# Altium footprint library PCB1.PcbLib: 25 footprints (part 1 of 2)
Each footprint in its own frame and in the unit in brackets; x right, y up, seen from the top. Pads: shape width x height; smd on the part's side, far side on the other; paste and mask are expansions set on the pad; w line width, h text height; cw(c..) or ccw(c..) is an arc to the next point about the centre after c.
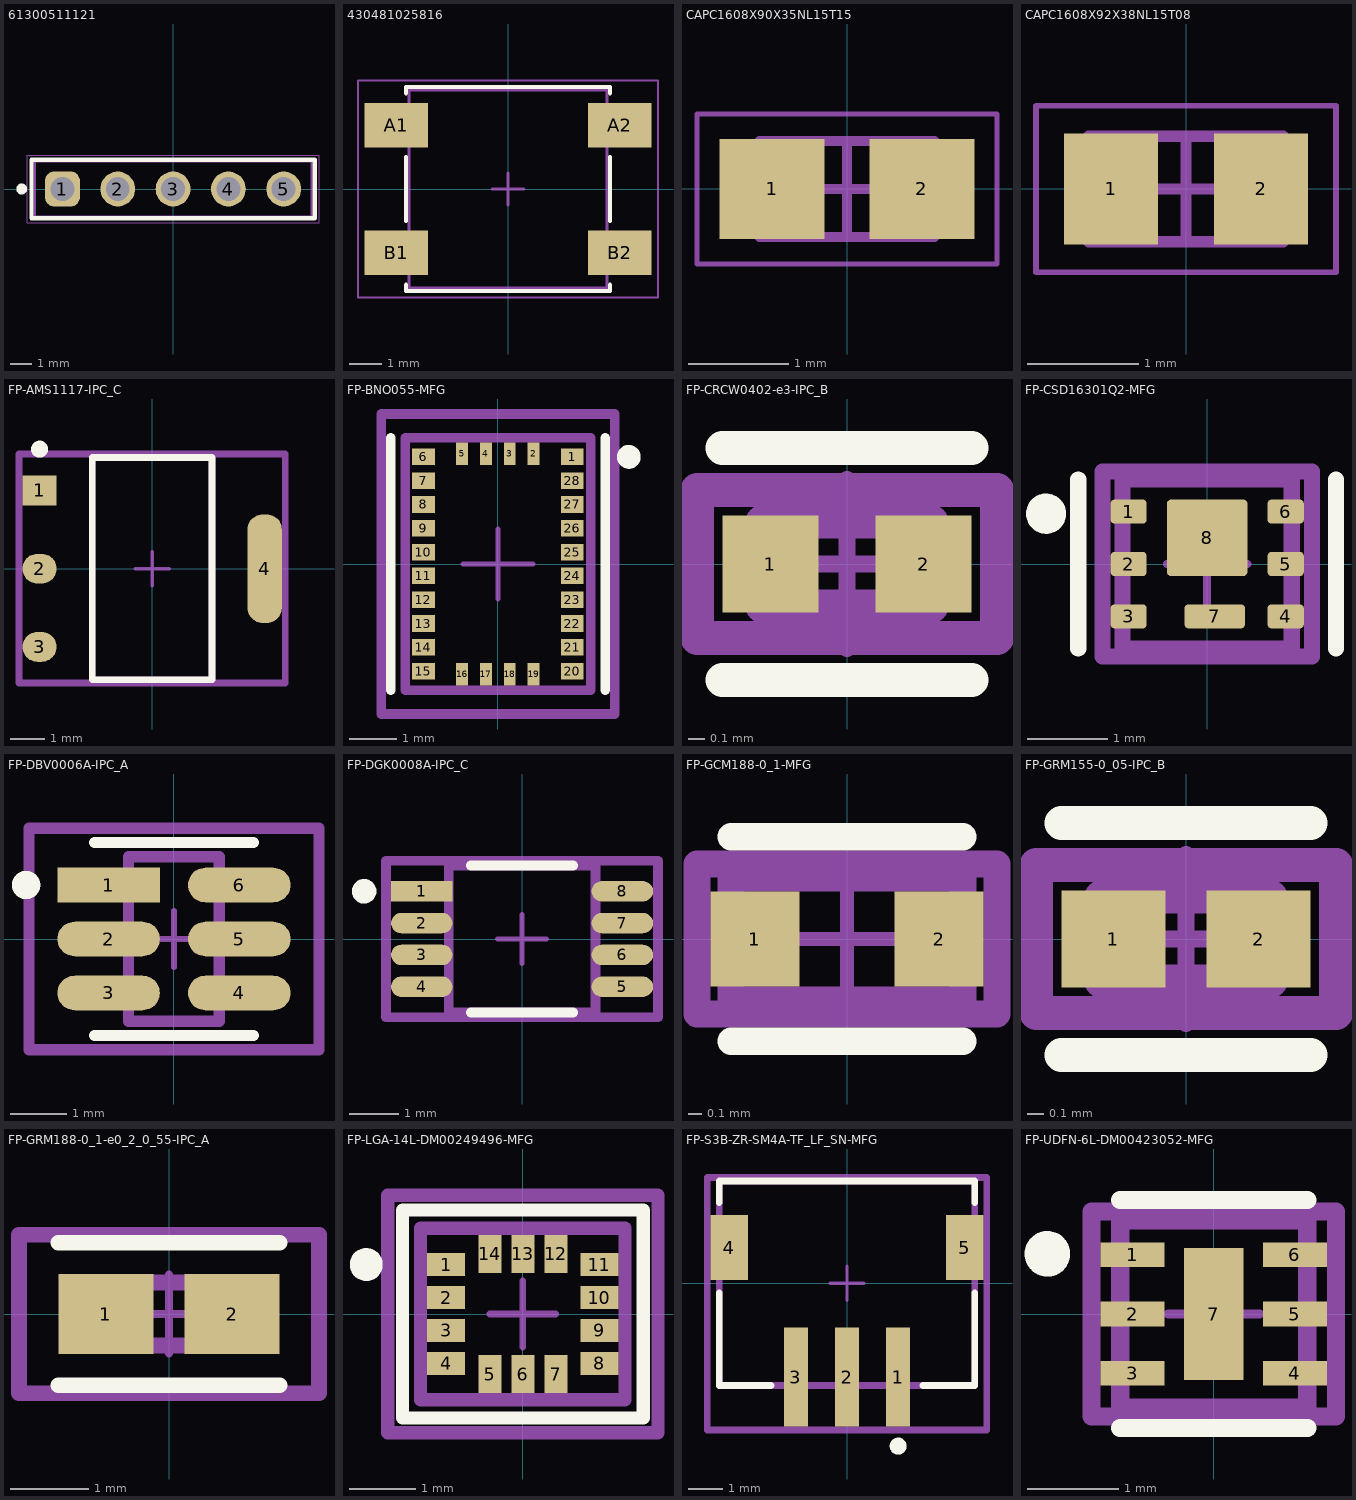
[diagram p0: the footprints below, top view; thin cyan lines are the x and y axes]

## 61300511121 [mm] "Pin Header, pitch 2.54 mm, THT, Vertical, single row, 5p"
height 8.54
pads (5):
  rrect50% 1.6x1.6 hole 1.1: 1(-5.08,0)
  round 1.6 hole 1.1: 2(-2.54,0) 3(0,0) 4(2.54,0) 5(5.08,0)
Top Overlay:
  circle w0.25: c-6.95,0 r0.125
  lines w0.2: -6.5,-1.345 -6.5,1.345 6.5,1.345 6.5,-1.345 -6.5,-1.345
Top Component Outline:
  lines w0.1: -6.35,-1.27 6.35,-1.27 6.35,1.27 -6.35,1.27 -6.35,-1.27
Top Courtyard:
  lines w0.05: -6.7,-1.545 6.7,-1.545 6.7,1.545 -6.7,1.545 -6.7,-1.545
Top Component Center:
  lines w0.05: -0.5,0 0.5,0 ; 0,-0.5 0,0.5
Top Designator:
  text ".Designator" at -7.498,-0.5 h1.5
3D body "61300511121.stp": height 8.57, standoff -2.97, extent -6.35,-1.27 6.35,1.27

## 430481025816 [mm] "SMD Tact Switch, body 6x6mm"
height 2.5
pads (4):
  rect 2x1.4 smd: A1(-3.5,2) A2(3.5,2) B1(-3.5,-2) B2(3.5,-2)
Top Overlay:
  lines w0.127: -3.2,-3 -3.2,-3.2 3.2,-3.2 3.2,-3 ; -3.2,-1 -3.2,1 ; -3.2,3 -3.2,3.2 3.2,3.2 3.2,3 ; 3.2,-1 3.2,1
Top Assembly:
  lines w0.1: -3.1,-2.35 -4,-2.35 -4,-1.65 -3.1,-1.65 ; -3.1,1.65 -4,1.65 -4,2.35 -3.1,2.35 ; 3.1,-2.35 4,-2.35 4,-1.65 3.1,-1.65 ; 3.1,1.65 4,1.65 4,2.35 3.1,2.35 ; -3.1,-3.1 -3.1,3.1 3.1,3.1 3.1,-3.1 -3.1,-3.1
Top Courtyard:
  lines w0.05: -4.7,-3.4 -4.7,3.4 4.7,3.4 4.7,-3.4 -4.7,-3.4
Top Component Center:
  lines w0.1: -0.5,0 0.5,0 ; 0,-0.5 0,0.5
Top Designator:
  text ".Designator" at -3.647,-0.357 h1
3D body "430481025816.stp": height 2.5, standoff 0, extent -4,-3.1 4,3.1

## CAPC1608X90X35NL15T15 [mm] "Chip Capacitor, 2-Leads, Body 1.60x0.81mm, IPC Medium Density"
height 0.9
pads (2):
  rect 1.05x1 smd: 1(-0.75,0) 2(0.75,0)
Top 3D Body:
  lines w0.1: -0.875,-0.48 0.875,-0.48 0.875,0.48 -0.875,0.48 -0.875,-0.48
Top Courtyard:
  lines w0.05: -1.5,-0.75 1.5,-0.75 1.5,0.75 -1.5,0.75 -1.5,-0.75
  lines w0.1: -0.48,0 0.48,0 ; 0,-0.48 0,0.48
3D body: height 0.9, standoff 0, extent 0.525,-0.48 0.875,0.48
3D body: height 0.9, standoff 0, extent -0.875,-0.48 -0.525,0.48
3D body: height 0.9, standoff 0, extent -0.525,-0.48 0.525,0.48

## CAPC1608X92X38NL15T08 [mm] "Chip Capacitor, 2-Leads, Body 1.60x0.80mm, IPC Medium Density"
height 0.92
pads (2):
  rect 0.85x1 smd: 1(-0.675,0) 2(0.675,0)
Top 3D Body:
  lines w0.1: -0.875,-0.475 0.875,-0.475 0.875,0.475 -0.875,0.475 -0.875,-0.475
Top Courtyard:
  lines w0.05: -1.35,-0.75 1.35,-0.75 1.35,0.75 -1.35,0.75 -1.35,-0.75
  lines w0.1: -0.475,0 0.475,0 ; 0,-0.475 0,0.475
3D body: height 0.92, standoff 0, extent 0.495,-0.475 0.875,0.475
3D body: height 0.92, standoff 0, extent -0.875,-0.475 -0.495,0.475
3D body: height 0.92, standoff 0, extent -0.495,-0.475 0.495,0.475

## FP-AMS1117-IPC_C [mm]
pads (4):
  rect 1.004x0.872 smd paste+0 mask+0: 1(-3.295,2.29)
  rrect100% 1.004x0.872 smd paste+0 mask+0: 2(-3.295,0) 3(-3.295,-2.29)
  rrect87% 1.004x3.182 smd paste+0 mask+0: 4(3.295,0)
Top Overlay:
  circle w0.25: c-3.295,3.5 r0.125
  lines w0.2: -1.753,-3.253 -1.753,3.253 1.753,3.253 1.753,-3.253 -1.753,-3.253
Top Assembly:
  lines w0.2: -3.897,-3.353 -3.897,3.353 3.897,3.353 3.897,-3.353 -3.897,-3.353
  text ".Designator" at 0,0.188 h1
Top 3D Body:
  lines w0.2: -1.753,-3.253 -1.753,3.253 1.753,3.253 1.753,-3.253 -1.753,-3.253
Top Courtyard:
  lines w0.2: -3.897,-3.353 -3.897,3.353 3.897,3.353 3.897,-3.353 -3.897,-3.353
Top Component Center:
  lines w0.1: -0.5,0 0.5,0 ; 0,-0.5 0,0.5
3D body "IC_Advanced_Monolithic_Systems_AMS1117-3_3_eec.STEP": height 0.25, standoff 0, extent -3.897,-3.353 3.897,3.353

## FP-BNO055-MFG [mm]
pads (28):
  rect 0.475x0.35 smd paste+0 mask-1000: 1(1.562,2.25) 6(-1.562,2.25) 7(-1.562,1.75) 8(-1.562,1.25) 9(-1.562,0.75) 10(-1.562,0.25) 11(-1.562,-0.25) 12(-1.562,-0.75) 13(-1.562,-1.25) 14(-1.562,-1.75) 15(-1.562,-2.25) 20(1.562,-2.25) 21(1.562,-1.75) 22(1.562,-1.25) 23(1.562,-0.75) 24(1.562,-0.25) 25(1.562,0.25) 26(1.562,0.75) 27(1.562,1.25) 28(1.562,1.75)
  rect 0.25x0.475 smd paste+0 mask-1000: 2(0.75,2.312) 3(0.25,2.312) 4(-0.25,2.312) 5(-0.75,2.312) 16(-0.75,-2.312) 17(-0.25,-2.312) 18(0.25,-2.312) 19(0.75,-2.312)
Top Overlay:
  circle w0.25: c2.75,2.25 r0.125
  lines w0.2: -2.25,-2.65 -2.25,2.65 ; 2.25,-2.65 2.25,2.65
Top Solder:
  rectangle: 0.6,-2.575 0.9,-2.05
  rectangle: 0.1,-2.575 0.4,-2.05
  rectangle: -0.4,-2.575 -0.1,-2.05
  rectangle: -0.9,-2.575 -0.6,-2.05
  rectangle: -0.9,2.05 -0.6,2.575
  rectangle: -0.4,2.05 -0.1,2.575
  rectangle: 0.1,2.05 0.4,2.575
  rectangle: 0.6,2.05 0.9,2.575
  rectangle: 1.3,-2.45 1.825,-2.05
  rectangle: 1.3,-1.95 1.825,-1.55
  rectangle: 1.3,-1.45 1.825,-1.05
  rectangle: 1.3,-0.95 1.825,-0.55
  rectangle: 1.3,-0.45 1.825,-0.05
  rectangle: 1.3,0.05 1.825,0.45
  rectangle: 1.3,0.55 1.825,0.95
  rectangle: 1.3,1.05 1.825,1.45
  rectangle: 1.3,1.55 1.825,1.95
  rectangle: 1.3,2.05 1.825,2.45
  rectangle: -1.825,-2.45 -1.3,-2.05
  rectangle: -1.825,-1.95 -1.3,-1.55
  rectangle: -1.825,-1.45 -1.3,-1.05
  rectangle: -1.825,-0.95 -1.3,-0.55
  rectangle: -1.825,-0.45 -1.3,-0.05
  rectangle: -1.825,0.05 -1.3,0.45
  rectangle: -1.825,0.55 -1.3,0.95
  rectangle: -1.825,1.05 -1.3,1.45
  rectangle: -1.825,1.55 -1.3,1.95
  rectangle: -1.825,2.05 -1.3,2.45
Top Assembly:
  lines w0.2: -2.45,-3.15 -2.45,3.15 2.45,3.15 2.45,-3.15 -2.45,-3.15
  text ".Designator" at 0,0 h1
Top 3D Body:
  lines w0.2: -1.95,-2.65 -1.95,2.65 1.95,2.65 1.95,-2.65 -1.95,-2.65
Top Courtyard:
  lines w0.2: -2.45,-3.15 -2.45,3.15 2.45,3.15 2.45,-3.15 -2.45,-3.15
Top Component Center:
  lines w0.1: -0.735,0 0.735,0 ; 0,-0.735 0,0.735
3D body "IC_Bosch_Sensortec_BNO055_eec.STEP": height 0.25, standoff 0, extent -2.45,-3.15 2.45,3.15

## FP-CRCW0402-e3-IPC_B [mm]
pads (2):
  rect 0.568x0.572 smd paste+0 mask+0: 1(-0.452,0) 2(0.452,0)
Top Overlay:
  lines w0.2: -0.736,-0.686 0.736,-0.686 ; -0.736,0.686 0.736,0.686
Top Assembly:
  lines w0.2: -0.886,-0.436 -0.886,0.436 0.886,0.436 0.886,-0.436 -0.886,-0.436
  text ".Designator" at 0,0.188 h1
Top 3D Body:
  lines w0.2: -0.5,-0.25 -0.5,0.25 0.5,0.25 0.5,-0.25 -0.5,-0.25
Top Courtyard:
  lines w0.2: -0.886,-0.436 -0.886,0.436 0.886,0.436 0.886,-0.436 -0.886,-0.436
Top Component Center:
  lines w0.1: -0.5,0 0.5,0 ; 0,-0.5 0,0.5
3D body "Res_Vishay_CRCW04021K00FKED_eec.STEP": height 0.25, standoff 0, extent -0.886,-0.436 0.886,0.436

## FP-CSD16301Q2-MFG [mm]
pads (8):
  rrect33% 0.45x0.3 smd paste+0 mask+0: 1(-0.975,0.65) 2(-0.975,0) 3(-0.975,-0.65) 4(0.975,-0.65) 5(0.975,0) 6(0.975,0.65)
  rrect33% 0.75x0.3 smd paste-1000 mask+0: 7(0.095,-0.65)
  rrect11% 1x0.95 smd paste-1000 mask+0: 8(0,0.325)
Top Overlay:
  circle w0.25: c-2,0.625 r0.125
  lines w0.2: -1.6,-1.05 -1.6,1.05 ; 1.6,-1.05 1.6,1.05
Top Paste:
  region: 0.4,0.755 0.41,0.755 0.428,0.747 0.442,0.733 0.45,0.715 0.45,0.705 0.45,-0.055 0.45,-0.065 0.442,-0.083 0.428,-0.097 0.41,-0.105 0.4,-0.105 -0.4,-0.105 -0.41,-0.105 -0.428,-0.097 -0.442,-0.083 -0.45,-0.065 -0.45,-0.055 -0.45,0.705 -0.45,0.715 -0.442,0.733 -0.428,0.747 -0.41,0.755 -0.4,0.755
  region: 0.395,-0.505 0.405,-0.505 0.423,-0.513 0.437,-0.527 0.445,-0.545 0.445,-0.555 0.445,-0.745 0.445,-0.755 0.437,-0.773 0.423,-0.787 0.405,-0.795 0.395,-0.795 -0.205,-0.795 -0.215,-0.795 -0.233,-0.787 -0.247,-0.773 -0.255,-0.755 -0.255,-0.745 -0.255,-0.555 -0.255,-0.545 -0.247,-0.527 -0.233,-0.513 -0.215,-0.505 -0.205,-0.505
Top Assembly:
  lines w0.2: -1.3,-1.15 -1.3,1.15 1.3,1.15 1.3,-1.15 -1.3,-1.15
  text ".Designator" at 0,0 h1
Top 3D Body:
  lines w0.2: -1.05,-1.05 -1.05,1.05 1.05,1.05 1.05,-1.05 -1.05,-1.05
Top Courtyard:
  lines w0.2: -1.3,-1.15 -1.3,1.15 1.3,1.15 1.3,-1.15 -1.3,-1.15
Top Component Center:
  lines w0.1: -0.5,0 0.5,0 ; 0,-0.5 0,0.5
3D body "Trans_Texas_Instruments_CSD16301Q2_eec.STEP": height 0.25, standoff 0, extent -1.3,-1.15 1.3,1.15

## FP-DBV0006A-IPC_A [mm]
pads (6):
  rect 1.805x0.61 smd paste+0 mask+0: 1(-1.15,0.95)
  rrect100% 1.805x0.61 smd paste+0 mask+0: 2(-1.15,0) 3(-1.15,-0.95) 4(1.15,-0.95) 5(1.15,0) 6(1.15,0.95)
Top Overlay:
  circle w0.25: c-2.603,0.95 r0.125
  lines w0.2: -1.4,-1.7 1.4,-1.7 ; -1.4,1.7 1.4,1.7
Top Assembly:
  lines w0.2: -2.553,-1.95 -2.553,1.95 2.553,1.95 2.553,-1.95 -2.553,-1.95
  text ".Designator" at 0,0.188 h1
Top 3D Body:
  lines w0.2: -0.8,-1.45 -0.8,1.45 0.8,1.45 0.8,-1.45 -0.8,-1.45
Top Courtyard:
  lines w0.2: -2.553,-1.95 -2.553,1.95 2.553,1.95 2.553,-1.95 -2.553,-1.95
Top Component Center:
  lines w0.1: -0.5,0 0.5,0 ; 0,-0.5 0,0.5
3D body "IC_Texas_Instruments_LM74700QDBVRQ1_eec.STEP": height 0.25, standoff 0, extent -2.553,-1.95 2.553,1.95

## FP-DGK0008A-IPC_C [mm]
pads (8):
  rect 1.257x0.418 smd paste+0 mask+0: 1(-2.051,0.975)
  rrect100% 1.257x0.418 smd paste+0 mask+0: 2(-2.051,0.325) 3(-2.051,-0.325) 4(-2.051,-0.975) 5(2.051,-0.975) 6(2.051,-0.325) 7(2.051,0.325) 8(2.051,0.975)
Top Overlay:
  circle w0.25: c-3.229,0.975 r0.125
  lines w0.2: -1.048,-1.5 1.048,-1.5 ; -1.048,1.5 1.048,1.5
Top Assembly:
  lines w0.2: -2.779,-1.6 -2.779,1.6 2.779,1.6 2.779,-1.6 -2.779,-1.6
  text ".Designator" at 0,0.188 h1
Top 3D Body:
  lines w0.2: -1.5,-1.5 -1.5,1.5 1.5,1.5 1.5,-1.5 -1.5,-1.5
Top Courtyard:
  lines w0.2: -2.779,-1.6 -2.779,1.6 2.779,1.6 2.779,-1.6 -2.779,-1.6
Top Component Center:
  lines w0.1: -0.5,0 0.5,0 ; 0,-0.5 0,0.5
3D body "IC_Texas_Instruments_TCA9803DGKR_eec.STEP": height 0.25, standoff 0, extent -2.779,-1.6 2.779,1.6

## FP-GCM188-0_1-MFG [mm]
pads (2):
  rect 0.65x0.7 smd paste+0 mask+0: 1(-0.675,0) 2(0.675,0)
Top Overlay:
  lines w0.2: -0.85,-0.75 0.85,-0.75 ; -0.85,0.75 0.85,0.75
Top Assembly:
  lines w0.2: -1.1,-0.55 -1.1,0.55 1.1,0.55 1.1,-0.55 -1.1,-0.55
  text ".Designator" at 0,0.188 h1
Top 3D Body:
  lines w0.2: -0.85,-0.45 -0.85,0.45 0.85,0.45 0.85,-0.45 -0.85,-0.45
Top Courtyard:
  lines w0.2: -1.1,-0.55 -1.1,0.55 1.1,0.55 1.1,-0.55 -1.1,-0.55
Top Component Center:
  lines w0.1: -0.5,0 0.5,0 ; 0,-0.5 0,0.5
3D body "Cap_Murata_GCM188R71E105KA64D_eec.STEP": height 0.25, standoff 0, extent -1.1,-0.55 1.1,0.55

## FP-GRM155-0_05-IPC_B [mm]
pads (2):
  rect 0.615x0.572 smd paste+0 mask+0: 1(-0.429,0) 2(0.429,0)
Top Overlay:
  lines w0.2: -0.736,-0.686 0.736,-0.686 ; -0.736,0.686 0.736,0.686
Top Assembly:
  lines w0.2: -0.886,-0.436 -0.886,0.436 0.886,0.436 0.886,-0.436 -0.886,-0.436
  text ".Designator" at 0,0.188 h1
Top 3D Body:
  lines w0.2: -0.5,-0.25 -0.5,0.25 0.5,0.25 0.5,-0.25 -0.5,-0.25
Top Courtyard:
  lines w0.2: -0.886,-0.436 -0.886,0.436 0.886,0.436 0.886,-0.436 -0.886,-0.436
Top Component Center:
  lines w0.1: -0.5,0 0.5,0 ; 0,-0.5 0,0.5
3D body "Cap_Murata_GRM1552C1H271GA01J_eec.STEP": height 0.25, standoff 0, extent -0.886,-0.436 0.886,0.436

## FP-GRM188-0_1-e0_2_0_55-IPC_A [mm]
pads (2):
  rect 1.208x1.012 smd paste+0 mask+0: 1(-0.802,0) 2(0.802,0)
Top Overlay:
  lines w0.2: -1.406,-0.906 1.406,-0.906 ; -1.406,0.906 1.406,0.906
Top Assembly:
  lines w0.2: -1.906,-1.006 -1.906,1.006 1.906,1.006 1.906,-1.006 -1.906,-1.006
  text ".Designator" at 0,0.188 h1
Top 3D Body:
  lines w0.2: -0.8,-0.4 -0.8,0.4 0.8,0.4 0.8,-0.4 -0.8,-0.4
Top Courtyard:
  lines w0.2: -1.906,-1.006 -1.906,1.006 1.906,1.006 1.906,-1.006 -1.906,-1.006
Top Component Center:
  lines w0.1: -0.5,0 0.5,0 ; 0,-0.5 0,0.5
3D body "Cap_Murata_GRM188R60J106KE47D_eec.STEP": height 0.25, standoff 0, extent -1.906,-1.006 1.906,1.006

## FP-LGA-14L-DM00249496-MFG [mm]
pads (14):
  rect 0.575x0.35 smd paste+0 mask+0: 1(-1.162,0.75) 2(-1.162,0.25) 3(-1.162,-0.25) 4(-1.162,-0.75) 8(1.162,-0.75) 9(1.162,-0.25) 10(1.162,0.25) 11(1.162,0.75)
  rect 0.35x0.575 smd paste+0 mask+0: 5(-0.5,-0.913) 6(0,-0.913) 7(0.5,-0.913) 12(0.5,0.913) 13(0,0.913) 14(-0.5,0.913)
Top Overlay:
  circle w0.25: c-2.375,0.75 r0.125
  lines w0.2: -1.825,-1.575 -1.825,1.575 1.825,1.575 1.825,-1.575 -1.825,-1.575
Top Assembly:
  lines w0.2: -2.05,-1.8 -2.05,1.8 2.05,1.8 2.05,-1.8 -2.05,-1.8
  text ".Designator" at 0,0.188 h1
Top 3D Body:
  lines w0.2: -1.55,-1.3 -1.55,1.3 1.55,1.3 1.55,-1.3 -1.55,-1.3
Top Courtyard:
  lines w0.2: -2.05,-1.8 -2.05,1.8 2.05,1.8 2.05,-1.8 -2.05,-1.8
Top Component Center:
  lines w0.1: -0.5,0 0.5,0 ; 0,-0.5 0,0.5
3D body "IC_STMicroelectronics_LSM6DSOTR_eec.STEP": height 0.25, standoff 0, extent -2.05,-1.8 2.05,1.8

## FP-S3B-ZR-SM4A-TF_LF_SN-MFG [mm]
pads (5):
  rect 0.7x2.9 smd paste+0 mask+0: 1(1.5,-2.75) 2(0,-2.75) 3(-1.5,-2.75)
  rect 1.1x1.9 smd paste+0 mask+0: 4(-3.45,1.05) 5(3.45,1.05)
Top Overlay:
  circle w0.25: c1.5,-4.775 r0.125
  lines w0.2: -3.75,-0.275 -3.75,-3 -2.225,-3 ; -3.75,2.375 -3.75,3 3.75,3 3.75,2.375 ; 2.225,-3 3.75,-3 3.75,-0.275
Top Assembly:
  lines w0.2: -4.1,-4.3 -4.1,3.1 4.1,3.1 4.1,-4.3 -4.1,-4.3
  text ".Designator" at 0,-0.6 h1
Top 3D Body:
  lines w0.2: -3.75,-3 -3.75,3 3.75,3 3.75,-3 -3.75,-3
Top Courtyard:
  lines w0.2: -4.1,-4.3 -4.1,3.1 4.1,3.1 4.1,-4.3 -4.1,-4.3
Top Component Center:
  lines w0.1: -0.5,0 0.5,0 ; 0,-0.5 0,0.5
3D body "Conn_JST_S3B-ZR-SM4A-TF_LF_SN_eec.STEP": height 0.25, standoff 0, extent -4.1,-4.3 4.1,3.1

## FP-UDFN-6L-DM00423052-MFG [mm]
pads (7):
  rect 0.7x0.27 smd paste+0 mask-1000: 1(-0.89,0.65) 2(-0.89,0) 3(-0.89,-0.65) 4(0.89,-0.65) 5(0.89,0) 6(0.89,0.65)
  rect 0.65x1.45 smd paste+0 mask-1000: 7(0,0)
Top Overlay:
  circle w0.25: c-1.825,0.66 r0.125
  lines w0.2: -1.025,-1.25 1.025,-1.25 ; -1.025,1.25 1.025,1.25
Top Solder:
  region: -1.34,0.885 -1.34,0.415 -0.44,0.415 -0.44,0.235 -1.34,0.235 -1.34,-0.235 -0.44,-0.235 -0.44,-0.415 -1.34,-0.415 -1.34,-0.885 -0.44,-0.885 -0.44,-0.825 0.44,-0.825 0.44,-0.885 1.34,-0.885 1.34,-0.415 0.44,-0.415 0.44,-0.235 1.34,-0.235 1.34,0.235 0.44,0.235 0.44,0.415 1.34,0.415 1.34,0.885 0.44,0.885 0.44,0.825 -0.44,0.825 -0.44,0.885
Top Assembly:
  lines w0.2: -1.34,-1.125 -1.34,1.125 1.34,1.125 1.34,-1.125 -1.34,-1.125
  text ".Designator" at 0,0.188 h1
Top 3D Body:
  lines w0.2: -1.025,-1.025 -1.025,1.025 1.025,1.025 1.025,-1.025 -1.025,-1.025
Top Courtyard:
  lines w0.2: -1.34,-1.125 -1.34,1.125 1.34,1.125 1.34,-1.125 -1.34,-1.125
Top Component Center:
  lines w0.1: -0.5,0 0.5,0 ; 0,-0.5 0,0.5
3D body "IC_STMicroelectronics_STTS22HTR_eec.STEP": height 0.25, standoff 0, extent -1.34,-1.125 1.34,1.125